# Altium footprint library 2020-05-10_15-34-12.PcbLib: 3 footprints
Each footprint in its own frame and in the unit in brackets; x right, y up, seen from the top. Pads: shape width x height; smd on the part's side, far side on the other; paste and mask are expansions set on the pad; w line width, h text height; cw(c..) or ccw(c..) is an arc to the next point about the centre after c.
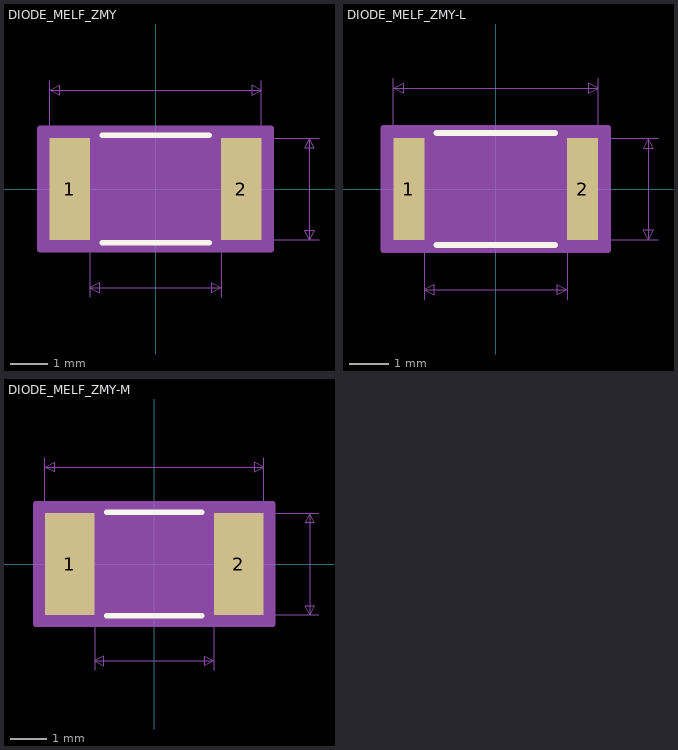
[diagram p0: the footprints below, top view; thin cyan lines are the x and y axes]

## DIODE_MELF_ZMY [mil]
pads (2):
  rect 42x106 smd: 1(-89.5,0) 2(89.5,0)
Top Overlay:
  lines w6: -55.75,-56 55.75,-56 ; -55.75,56 55.75,56
Mechanical 5:
  region: 118,-60.5 -118,-60.5 -118,60.5 118,60.5
Mechanical 7:
  lines w1: -110.5,63 -110.5,113 ; -68.5,-113 -68.5,-63 ; 68.5,-113 68.5,-63 ; 110.5,63 110.5,113 ; 120.5,-53 170.5,-53 ; 120.5,53 170.5,53 ; -110.5,103 110.5,103 ; -110.5,103 -100.5,108 -100.5,98 -110.5,103 ; -68.5,-103 68.5,-103 ; -68.5,-103 -58.5,-108 -58.5,-98 -68.5,-103 ; 68.5,-103 58.5,-108 58.5,-98 68.5,-103 ; 110.5,103 100.5,108 100.5,98 110.5,103 ; 160.5,-53 160.5,53 ; 160.5,-53 155.5,-43 165.5,-43 160.5,-53 ; 160.5,53 155.5,43 165.5,43 160.5,53
  text "Default Padstyle: RX42Y106D0T" at -362.5,-223 h50
  text "Alt 1 Padstyle: OX60Y90D30P" at -337.5,-283 h50
  text "Alt 2 Padstyle: OX90Y60D30P" at -337.5,-343 h50
  text ".106in/2.692mm" at 170.5,-12.5 h25
Mechanical 13:
  lines w1: -94.5,-25.5 -69,-51 ; -94.5,25.5 -69,51 ; -94.5,-51 94.5,-51 94.5,51 -94.5,51 -94.5,-51
Mechanical 15:
  region: 120.5,-63 -120.5,-63 -120.5,63 120.5,63
  lines w6: -120.5,-63 -120.5,63 120.5,63 120.5,-63 -120.5,-63
3D body: height 10, standoff 0, extent 0,0 10,10

## DIODE_MELF_ZMY-L [mil]
pads (2):
  rect 31x102 smd paste+0 mask+0: 1(-87,0) 2(87,0)
Top Overlay:
  lines w6: -59.39,-56 59.39,-56 ; -59.39,56 59.39,56
Mechanical 5:
  region: 110,-58.5 -110,-58.5 -110,58.5 110,58.5
Mechanical 7:
  lines w1: -102.5,61 -102.5,111 ; -71.5,-111 -71.5,-61 ; 71.5,-111 71.5,-61 ; 102.5,61 102.5,111 ; 112.5,-51 162.5,-51 ; 112.5,51 162.5,51 ; -102.5,101 102.5,101 ; -102.5,101 -92.5,106 -92.5,96 -102.5,101 ; -71.5,-101 71.5,-101 ; -71.5,-101 -61.5,-106 -61.5,-96 -71.5,-101 ; 71.5,-101 61.5,-106 61.5,-96 71.5,-101 ; 102.5,101 92.5,106 92.5,96 102.5,101 ; 152.5,-51 152.5,51 ; 152.5,-51 147.5,-41 157.5,-41 152.5,-51 ; 152.5,51 147.5,41 157.5,41 152.5,51
  text "Default Padstyle: RX31Y102D0T" at -362.5,-221 h50
  text "Alt 1 Padstyle: OX60Y90D30P" at -337.5,-281 h50
  text "Alt 2 Padstyle: OX90Y60D30P" at -337.5,-341 h50
  text ".102in/2.591mm" at 162.5,-12.5 h25
Mechanical 13:
  lines w1: -94.5,-25.5 -69,-51 ; -94.5,25.5 -69,51 ; -94.5,-51 94.5,-51 94.5,51 -94.5,51 -94.5,-51
Mechanical 15:
  region: 112.5,-61 -112.5,-61 -112.5,61 112.5,61
  lines w6: -112.5,-61 -112.5,61 112.5,61 112.5,-61 -112.5,-61
3D body: height 10, standoff 0, extent 0,0 10,10

## DIODE_MELF_ZMY-M [mil]
pads (2):
  rect 54x110 smd paste+0 mask+0: 1(-91.5,0) 2(91.5,0)
Top Overlay:
  lines w6: -51.44,-56 51.44,-56 ; -51.44,56 51.44,56
Mechanical 5:
  region: 126,-62.5 -126,-62.5 -126,62.5 126,62.5
Mechanical 7:
  lines w1: -118.5,65 -118.5,115 ; -64.5,-115 -64.5,-65 ; 64.5,-115 64.5,-65 ; 118.5,65 118.5,115 ; 128.5,-55 178.5,-55 ; 128.5,55 178.5,55 ; -118.5,105 118.5,105 ; -118.5,105 -108.5,110 -108.5,100 -118.5,105 ; -64.5,-105 64.5,-105 ; -64.5,-105 -54.5,-110 -54.5,-100 -64.5,-105 ; 64.5,-105 54.5,-110 54.5,-100 64.5,-105 ; 118.5,105 108.5,110 108.5,100 118.5,105 ; 168.5,-55 168.5,55 ; 168.5,-55 163.5,-45 173.5,-45 168.5,-55 ; 168.5,55 163.5,45 173.5,45 168.5,55
  text "Default Padstyle: RX54Y110D0T" at -362.5,-225 h50
  text "Alt 1 Padstyle: OX60Y90D30P" at -337.5,-285 h50
  text "Alt 2 Padstyle: OX90Y60D30P" at -337.5,-345 h50
  text ".11in/2.794mm" at 178.5,-12.5 h25
Mechanical 13:
  lines w1: -94.5,-25.5 -69,-51 ; -94.5,25.5 -69,51 ; -94.5,-51 94.5,-51 94.5,51 -94.5,51 -94.5,-51
Mechanical 15:
  region: 128.5,-65 -128.5,-65 -128.5,65 128.5,65
  lines w6: -128.5,-65 -128.5,65 128.5,65 128.5,-65 -128.5,-65
3D body: height 10, standoff 0, extent 0,0 10,10